# Altium footprint library 0805_5%_Resistor.PcbLib: 21 footprints (part 2 of 2)
Each footprint in its own frame and in the unit in brackets; x right, y up, seen from the top. Pads: shape width x height; smd on the part's side, far side on the other; paste and mask are expansions set on the pad; w line width, h text height; cw(c..) or ccw(c..) is an arc to the next point about the centre after c.
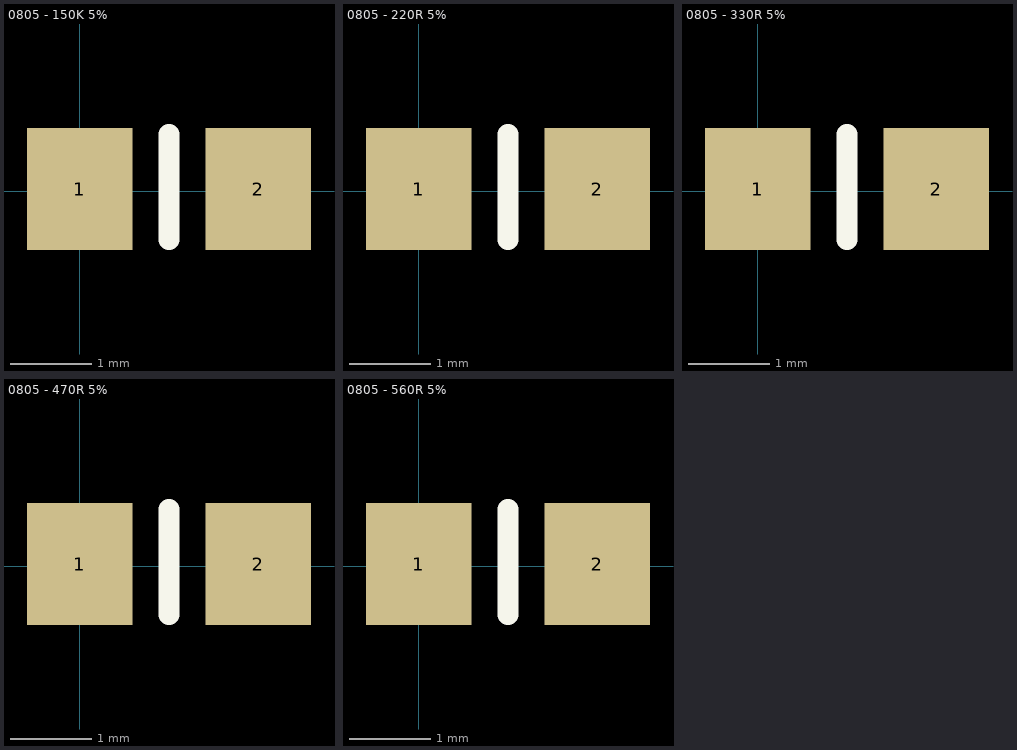
[diagram p1: the footprints below, top view; thin cyan lines are the x and y axes]

## 0805 - 150K 5% [mm]
pads (2):
  rect 1.3x1.5 smd: 1(0,0.025) 2(2.2,0.025)
Top Overlay:
  lines w0.254: 1.1,-0.6 1.1,0.7
3D body "150k.STEP": height 0.45, standoff 0, extent 0.175,-0.6 2.175,0.65

## 0805 - 220R 5% [mm]
pads (2):
  rect 1.3x1.5 smd: 1(0,0.025) 2(2.2,0.025)
Top Overlay:
  lines w0.254: 1.1,-0.6 1.1,0.7
3D body "220R 5%.STEP": height 0.43, standoff -0.02, extent 0.125,-0.6 2.125,0.65

## 0805 - 330R 5% [mm]
pads (2):
  rect 1.3x1.5 smd: 1(0,0.025) 2(2.2,0.025)
Top Overlay:
  lines w0.254: 1.1,-0.6 1.1,0.7
3D body "330R 5%.STEP": height 0.43, standoff -0.02, extent 0.125,-0.6 2.125,0.65

## 0805 - 470R 5% [mm]
pads (2):
  rect 1.3x1.5 smd: 1(0,0.025) 2(2.2,0.025)
Top Overlay:
  lines w0.254: 1.1,-0.6 1.1,0.7
3D body "470R 5%.STEP": height 0.43, standoff -0.02, extent 0.125,-0.6 2.125,0.65

## 0805 - 560R 5% [mm]
pads (2):
  rect 1.3x1.5 smd: 1(0,0.025) 2(2.2,0.025)
Top Overlay:
  lines w0.254: 1.1,-0.6 1.1,0.7
3D body "560R.STEP": height 0.45, standoff 0, extent 0.175,-0.6 2.175,0.65